# EAGLE library part BQ24074 (library orb)
TI BQ24074RGTR charger and power path (VQFN-16)
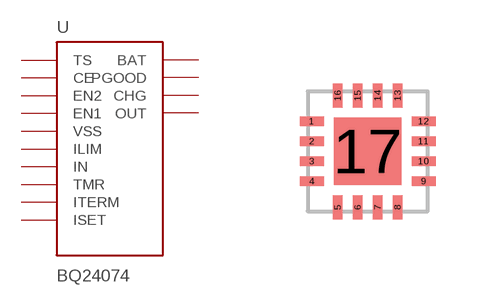
[diagram p3: symbol with the pads of VQFN16_3X3; footprint VQFN16_3X3]

Designator prefix U

## BQ24074  [VQFN16_3X3]
1  TS  pas
2  BAT  pas
3  BAT  pas
4  CE  pas
5  EN2  pas
6  EN1  pas
7  PGOOD  pas
8  VSS  pas
9  CHG  pas
10  OUT  pas
11  OUT  pas
12  ILIM  pas
13  IN  pas
14  TMR  pas
15  ITERM  pas
16  ISET  pas
17  VSS  pas

## Footprint VQFN16_3X3 (pad centres in mm)
TI BQ24074 RGT0016C land pattern, drawing 4222419/E, July 2025. Exposed pad requires a production stencil and thermal-via review. Source: https://www.ti.com/lit/ds/symlink/bq24074.pdf
smd 0.6 x 0.24: 1 -1.4,0.75; 2 -1.4,0.25; 3 -1.4,-0.25; 4 -1.4,-0.75; 9 1.4,-0.75; 10 1.4,-0.25; 11 1.4,0.25; 12 1.4,0.75
smd 0.24 x 0.6: 5 -0.75,-1.4; 6 -0.25,-1.4; 7 0.25,-1.4; 8 0.75,-1.4; 13 0.75,1.4; 14 0.25,1.4; 15 -0.25,1.4; 16 -0.75,1.4
smd 1.68 x 1.68: 17 0,0